# Altium schematic symbol library R_47K.SchLib: 1 symbol
Pins are listed as number, name and electrical type; pins without a type are passive.

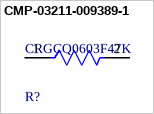
[diagram p0: symbol CMP-03211-009389-1]

## CMP-03211-009389-1
designator R?, comment CRGCQ0603F47K
CRGCQ 0603 47K 1%; Manufacturer: TE Connectivity; Voltage Rating: 75V; Power Rating: 0.1W; Tolerance: 0.01; Temperature Coefficient: ±100ppm/°C; Value: 47KΩ; Series: CRGCQ; Device Class L3: Chip SMD Resistors; Manufacturer Part Number: CRGCQ0603F47K; ComponentLink2Description: Datasheet; Ipc Land Pattern Name: RESC16080X45; Ambient Temperature Range High: +70°C; Package: CRGCQ0603; Height: 0.55mm; Lead Free: Yes; ComponentLink2URL: https://www.te.com/commerce/DocumentDelivery/DDEController?Action=showdoc&DocId=Data+Sheet%7F1773204-3%7F1%7Fpdf%7FEnglish%7FENG_DS_1773204-3_1.pdf%7F4-2176339-1074; Temperature Range Low: -55°C; Octopart: https://octopart.com/crgcq0603f47k-te+connectivity-91018077; RoHS: TRUE; Temperature: -55°C to +155°C; Temperature Range High: +155°C; Digikey Description: CRGCQ 0603 47K 1%; Device Class L1: Passive Components; Composition: Thick Film; Mouser Description: Res Thick Film 0603 47K Ohm 1% 0.1W(1/10W) ±100ppm/C Pad SMD Automotive T/R; Resistance: 47KΩ; Device Class L2: Resistors; Category: Res
footprint FP-CRGCQ0603-IPC_C
footprint FP-CRGCQ0603-IPC_B
footprint FP-CRGCQ0603-IPC_A
pins: 1, 2